# Altium footprint library OS102011MA1QN1.PCBLIB: 1 footprints
Each footprint in its own frame and in the unit in brackets; x right, y up, seen from the top. Pads: shape width x height; smd on the part's side, far side on the other; paste and mask are expansions set on the pad; w line width, h text height; cw(c..) or ccw(c..) is an arc to the next point about the centre after c.
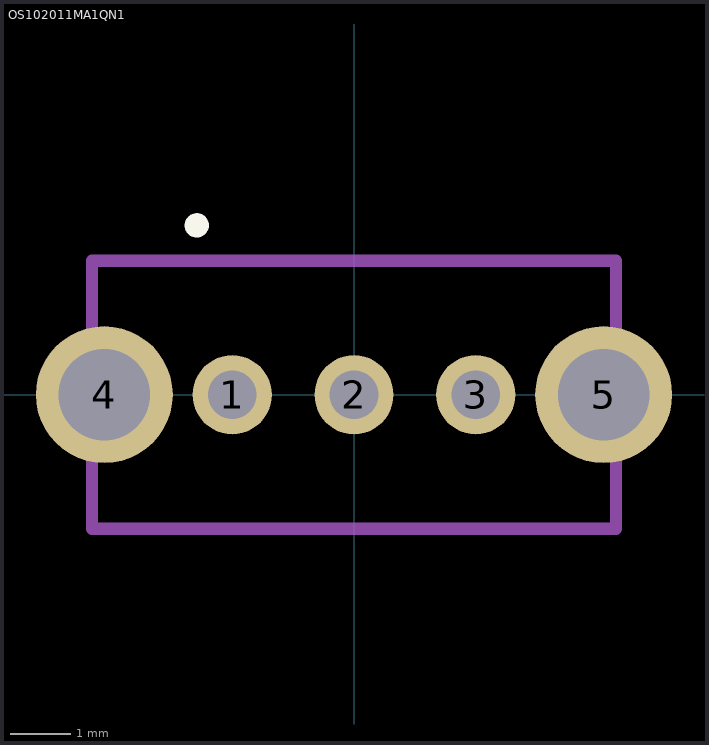
[diagram p0: the footprint, top view; thin cyan lines are the x and y axes]

## OS102011MA1QN1 [mil]
pads (5):
  round 51.18 hole 31.5: 1(-78.74,0) 2(0,0) 3(78.74,0)
  round 88.58 hole 59.06: 4(-161.42,0) 5(161.42,0)
Top Overlay:
  circle w7.87: c-101.69,109.49 r3.91
tDocu:
  lines w7.87: -169.29,-86.61 169.29,-86.61 169.29,86.61 -169.29,86.61 -169.29,-86.61
tPlace:
  lines w7.87: -169.29,-86.61 169.29,-86.61 ; -169.29,86.61 169.29,86.61